# EAGLE library part 502494-0470 (library 502494-0470)
MOLEX - 502494-0470 - RECEPTACLE, R/A, SMT, 4WAY, 2MM Source: Datasheet <https://www.molex.com/pdm_docs/sd/5024940470_sd.pdf>
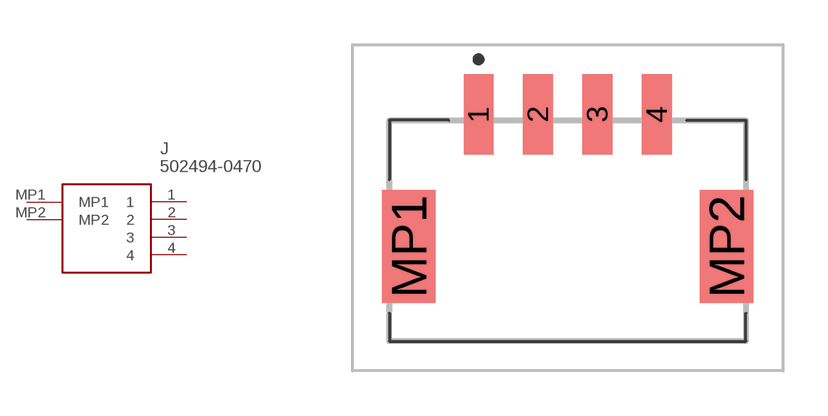
[diagram p0: symbol with the pads of 5024940470; footprint 5024940470]

Designator prefix J

## 502494-0470 (Description: MOLEX - 502494-0470 - RECEPTACLE, R/A, SMT, 4WAY, 2MM; Height: 6.85mm; Manufacturer_Name: Molex; Manufacturer_Part_Number: 502494-0470; Mouser_Part_Number: 538-502494-0470; Mouser_Price-Stock: https://www.mouser.co.uk/ProductDetail/Molex/502494-0470/?qs=zRnNmUVysJf%252Bc0fbcAK02g%3D%3D)  [5024940470]
1  1
2  2
3  3
4  4
MP1  MP1
MP2  MP2

## Footprint 5024940470 (pad centres in mm)
502494-0470
smd 1 x 2.7: 1 -3,3.15; 2 -1,3.15; 3 1,3.15; 4 3,3.15
smd 1.8 x 3.8: MP1 -5.35,-1.3; MP2 5.35,-1.3